# Altium schematic symbol library HY2120-OB.SchLib: 1 symbol
Pins are listed as number, name and electrical type; pins without a type are passive.

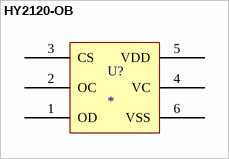
[diagram p0: symbol HY2120-OB]

## HY2120-OB
designator U?
2-cell Li-ion/Li-polymer battery protection IC with overcharge, over-discharge, overcurrent, and short-circuit protection.
footprint SOT23-6
pins: 1 OD, 2 OC, 3 CS, 4 VC, 5 VDD, 6 VSS